# Altium integrated library Capacitores_SMD.IntLib: 3 symbols
Pins are listed as number, name and electrical type; pins without a type are passive.

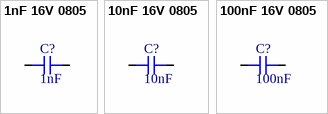
[diagram p0: symbols 1nF 16V 0805 to 100nF 16V 0805]

## 1nF 16V 0805
designator C?, comment 1nF
Capacitor 0805 1nF 16V
footprint 0805 Capacitor
pins: 1, 2

## 10nF 16V 0805
designator C?, comment 10nF
Capacitor 0805 10nF 16V
footprint 0805 Capacitor
pins: 1, 2

## 100nF 16V 0805
designator C?, comment 100nF
Capacitor 0805 100nF 16V
footprint 0805 Capacitor
pins: 1, 2